# Altium schematic symbol library resistor.SchLib: 1 symbol
Pins are listed as number, name and electrical type; pins without a type are passive.

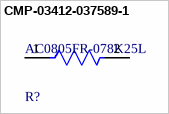
[diagram p0: symbol CMP-03412-037589-1]

## CMP-03412-037589-1
designator R?, comment AC0805FR-078K25L
RES SMD 8.25K OHM 1% 1/8W 0805; Manufacturer: Yageo; Tolerance: 0.01; Voltage Rating: 150V; Automotive Grade: Grade 0; Value: 8.25KΩ; Manufacturer Part Number: AC0805FR-078K25L; Category: Res; Device Class L3: Chip SMD Resistors; Octopart: https://octopart.com/ac0805fr-078k25l-yageo-30510942; RoHS: TRUE; Package: AC0805; Temperature Range Low: -55°C; Composition: Thick Film; Series: AC; Ipc Land Pattern Name: RESC200125X50; Temperature: -55°C to +155°C; Device Class L2: Resistors; Footprint Url: http://www.yageo.com/exep/pages/download/literatures/PYu-R_Mount_10.pdf; Device Class L1: Passive Components; ComponentLink2Description: Datasheet; Automotive: Yes; ComponentLink2URL: http://www.yageo.com/documents/recent/PYu-AC_51_RoHS_L_6.pdf; Digikey Description: RES SMD 8.25K OHM 1% 1/8W 0805; Power Rating: 1/8W; Height: 0.6mm; Lead Free: Yes; Temperature Range High: +155°C; Resistance: 8.25KΩ
footprint FP-AC0805-IPC_C
footprint FP-AC0805-IPC_B
footprint FP-AC0805-MFG
footprint FP-AC0805-IPC_A
pins: 1, 2